# Altium integrated library MOV-14D471K.IntLib: 1 symbol
Pins are listed as number, name and electrical type; pins without a type are passive.

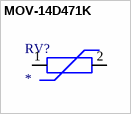
[diagram p0: symbol MOV-14D471K]

## MOV-14D471K
designator RV?
MOV-14D471K varistor for surge protection in power supply and industrial electronics; MF: HuaXingAn Electronics; SnapEDA_Link: https://www.snapeda.com/parts/MOV-14D471K/HuaXingAn+Electronics/view-part/?ref=snap; Package: None; Value: *; MP: MOV-14D471K; Check_prices: https://www.snapeda.com/parts/MOV-14D471K/HuaXingAn+Electronics/view-part/?ref=eda
footprint MOV14D471K
pins: 1 (io), 2 (io)